# Altium schematic symbol library Driver.SchLib: 7 symbols
Pins are listed as number, name and electrical type; pins without a type are passive.

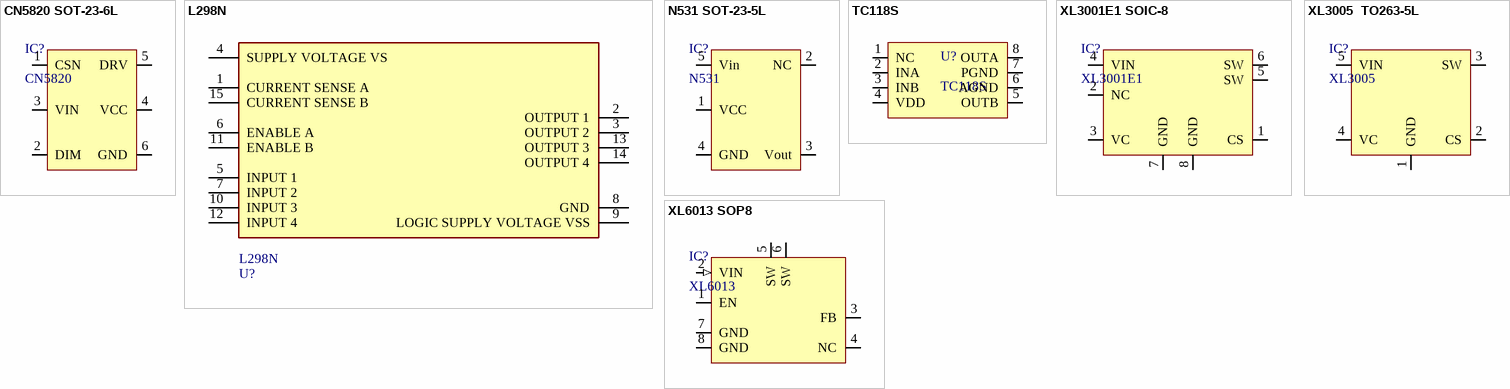
[diagram p0: symbols CN5820 SOT-23-6L to XL6013 SOP8]

## CN5820 SOT-23-6L
designator IC?, comment CN5820
High-Side Current Sensing Switching High Brightness LED Driver IC; Code: N/A; ComponentLink1Description: Datasheet; ComponentLink1URL: http://www.consonance-elec.com/static/upload/file/20220424/1650758377171412.pdf
footprint SOT-23-6
pins: 1 CSN, 2 DIM, 3 VIN, 4 VCC, 5 DRV, 6 GND

## L298N
designator U?
IC BRIDGE DRIVER PAR 15MULTIWATT; Code: 5007-096; ComponentLink2Description: Datasheet; ComponentLink2URL: https://upverter.com/datasheet/4e6acc8e34692b9176918ad45905b166727b88f4.pdf; Part Number: L298N
footprint STMicroelectronics_L298N_0
footprint STMicroelectronics_L298N_0 - Heatsink
pins: 1 CURRENT SENSE A, 2 OUTPUT 1, 3 OUTPUT 2, 4 SUPPLY VOLTAGE VS, 5 INPUT 1, 6 ENABLE A, 7 INPUT 2, 8 GND, 9 LOGIC SUPPLY VOLTAGE VSS, 10 INPUT 3, 11 ENABLE B, 12 INPUT 4, 13 OUTPUT 3, 14 OUTPUT 4, 15 CURRENT SENSE B

## N531 SOT-23-5L
designator IC?, comment N531
Vin = 5~18V; Code: 1903-005; Designed by: TranLuyen; ComponentLink1Description: Datasheet; ComponentLink1URL: https://www.thegioiic.com/upload/documents/44316274ecaf051e318270d8986fa995.pdf?gidzl=NmTAPqH4rmbP7ajaGrdH35uOIs1Q28TV4aiPCmyDrreGIXjZM5tG2qKRJ6XMMjW17qX3FcGgTArQHaVU1G
footprint SOT-23-5
pins: 1 VCC, 2 NC, 3 Vout, 4 GND, 5 Vin

## TC118S
designator U?
H brigde, 2.4V-7.2V, Max 1.8A, Motor Driver; Code: N/A
footprint SO_8 (SOP-8, 5x3.9mm body 1.27mm pitch, SOT96-1, M08A, S8, SOIC8, VO8, MS-012AA(JEDEC), R-8, 8S2, VOG8)
pins: 1 NC, 2 INA, 3 INB, 4 VDD, 5 OUTB, 6 AGND, 7 PGND, 8 OUTA

## XL3001E1 SOIC-8
designator IC?, comment XL3001E1
220KHz 40V 3A switching current step-down (buck) LED constant current driver; Code: 5007-144; Designed by: TranLuyen; ComponentLink1Description: Datasheet; ComponentLink1URL: https://www.xlsemi.com/datasheet/XL3001-EN.pdf
footprint SO_8 (SOP-8, 5x3.9mm body 1.27mm pitch, SOT96-1, M08A, S8, SOIC8, VO8, MS-012AA(JEDEC), R-8, 8S2, VOG8)
pins: 1 CS, 2 NC, 3 VC, 4 VIN, 5 SW, 6 SW, 7 GND, 8 GND

## XL3005  TO263-5L
designator IC?, comment XL3005
5A 220KHz 36V Buck LED Constant Current Driver; Designed by: TranLuyen; Code: N/A; ComponentLink1Description: Datasheet; ComponentLink1URL: https://www.xlsemi.com/datasheet/XL3005-EN.pdf
footprint TO-263-5
pins: 1 GND, 2 CS, 3 SW, 4 VC, 5 VIN

## XL6013 SOP8
designator IC?, comment XL6013
400KHz 60V 2A Switching Current Boost LED Constant Current Driver; Code: 5007-132; Designed by: TranLuyen; ComponentLink1Description: Datasheets; ComponentLink1URL: https://www.xlsemi.com/datasheet/XL6013-EN.pdf
footprint SO_8 (SOP-8, 5x3.9mm body 1.27mm pitch, SOT96-1, M08A, S8, SOIC8, VO8, MS-012AA(JEDEC), R-8, 8S2, VOG8)
pins: 1 EN "Enable Pin. Drive EN pin low to turn off the device, drive it", 2 VIN (in) "5V to 40V", 3 FB "Feedback Pin (FB). The feedback threshold voltage is 0.22V", 4 NC "No Connected.", 5 SW, 6 SW, 7 GND, 8 GND